# Altium schematic symbol library MOS.SchLib: 1 symbol
Pins are listed as number, name and electrical type; pins without a type are passive.

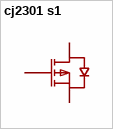
[diagram p0: symbol cj2301 s1]

## cj2301 s1
designator Q??  (value not drawn)
数量:1个P沟道;漏源电压(Vdss):20V;连续漏极电流(Id):2.3A;导通电阻(RDS(on)):142mΩ@2.5V;耗散功率(Pd):350mW;阈值电压(Vgs(th)):1V;; Manufacturer: CJ(江苏长电/长晶); AddInBom: yes; ModelId: 89cb27a44ab2466697082bb9fd73a7d0; ModelName: SOT-23-3L_L2.9-W1.6-H1.1-LS2.8-P0.95; ModelTransform: 114.173,110.236,0,90,0,0,0,0,0; Number: 1个P沟道; Drain to Source Voltage: 20V; Current - Continuous Drain(Id): 2.3A; Pd - Power Dissipation: 350mW; Gate Threshold Voltage (Vgs(th)): 1V; Gate Charge(Qg): 5.5nC; Input Capacitance(Ciss): 405pF; Reverse Transfer Capacitance (Crss@Vds): 55pF; Type: P沟道; Output Capacitance(Coss): 75pF; Vgs: ±8V; Symbol: CJ2301 S1; LCSC Part Name: 1个P沟道 耐压:20V 电流:2.3A; SupplierPart: C8547; ManufacturerPart: CJ2301 S1; Supplier Footprint: SOT-23; JLCPCB Part Class: Extended Part; Datasheet: https://item.szlcsc.com/datasheet/CJ2301%2520S1/9042.html; Supplier: LCSC; ConvertToPcb: yes; FootprintName: SOT-23-3_L3.0-W1.7-P0.95-LS2.9-BR; RDS(on): 142mΩ@2.5V; Operating Temperature: -55℃~+150℃
footprint SOT-23-3_L3.0-W1.7-P0.95-LS2.9-BR
pins: 1 G, 2 S, 3 D